# Altium footprint library KH-TYPE-C-16P.PcbLib: 1 footprints
Each footprint in its own frame and in the unit in brackets; x right, y up, seen from the top. Pads: shape width x height; smd on the part's side, far side on the other; paste and mask are expansions set on the pad; w line width, h text height; cw(c..) or ccw(c..) is an arc to the next point about the centre after c.
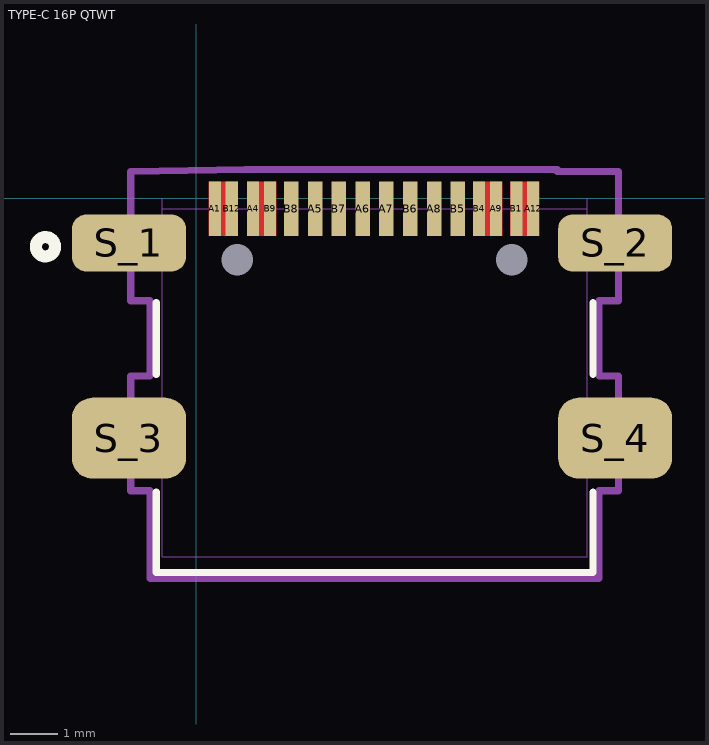
[diagram p0: the footprint, top view; thin cyan lines are the x and y axes]

## TYPE-C 16P QTWT [mil] "USB Type-C Female Connector USB 3, Right Angle, 16P 3A 1 Ports"
pads (22):
  oval 0x26 hole 26 unplated paste-99999 mask+0: 21(33.9,-50.94) 22(261.45,-50.94)
  rect 10x45 smd paste+0 mask+0: A1(15.32,-8.5) A4(47.04,-8.5) A9(248.31,-8.5) A12(279.06,-8.5) B1(265.06,-8.5) B4(234.31,-8.5) B9(61.04,-8.5) B12(29.32,-8.5)
  rect 12x45 smd paste+0 mask+0: A5(98.45,-8.5) A6(137.83,-8.5) A7(157.52,-8.5) A8(196.9,-8.5) B5(216.59,-8.5) B6(177.21,-8.5) B7(118.14,-8.5) B8(78.76,-8.5)
  rrect50% 94.49x47.24 smd paste-99999 mask+0: S_1(-55.87,-36.81) S_2(346.97,-36.81)
  rrect50% 94.49x66.93 smd paste-99999 mask+0: S_3(-55.87,-198.57) S_4(346.97,-198.57)
Top Layer:
  region: 66.04,14 42.04,14 42.04,-31 66.04,-31
  region: 34.32,14 10.32,14 10.32,-31 34.32,-31
  region: 253.31,14 229.31,14 229.31,-31 253.31,-31
  region: 284.06,14 260.06,14 260.06,-31 284.06,-31
Top Overlay:
  circle w10: c-125,-40 r8
  lines w6: -33.33,-309.88 -33.33,-243.5 ; -33.33,-309.87 328.68,-309.87 ; -33.33,-145.78 -33.33,-86.11 ; 328.68,-309.88 328.68,-243.5 ; 328.68,-145.78 328.68,-86.11
Bottom Overlay:
  circle w10: c-125,-40 r8
Mechanical 13:
  lines w1: -28.32,-8.5 323.68,-8.5 ; -28.32,0 -28.32,-297 323.68,-297 323.68,0
Mechanical 15:
  lines w6: -38.33,-314.88 -38.33,-242.14 -54.41,-242.14 -54.41,-147.14 -38.33,-147.14 -38.33,-84.75 -54.41,-84.75 -54.41,22.25 40.38,24 298.97,24 298.97,22.25 349.75,22.25 349.75,-84.75 333.68,-84.75 333.68,-147.14 349.75,-147.14 349.75,-242.14 333.68,-242.14 333.68,-314.88 ; -38.33,-314.87 333.68,-314.87
3D body "usb-c_16pins_lateral.step": height 125.98, standoff -24.8, extent -87.01,-309.06 381.5,7.87